# Altium schematic symbol library LMG2100R044RARR.SchLib: 1 symbol
Pins are listed as number, name and electrical type; pins without a type are passive.

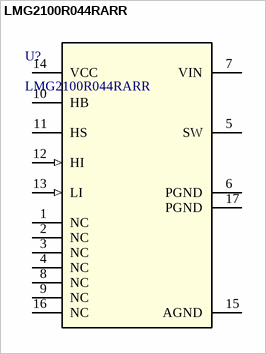
[diagram p0: symbol LMG2100R044RARR]

## LMG2100R044RARR
designator U?
100-V 4.4-mâ„¦ half-bridge GaN FET with integrated driver and protection 16-VQFN-FCRLF -40 to 125; Manufacturer_Name: Texas Instruments; TYPE: TYPE; RefDes: RefDes; Copyright: Copyright (C) 2026 Ultra Librarian. All rights reserved.; Manufacturer_Part_Number: LMG2100R044RARR
footprint RAR0016B-MFG
pins: 1 NC, 2 NC, 3 NC, 4 NC, 5 SW (power), 6 PGND (power), 7 VIN (power), 8 NC, 9 NC, 10 HB (power), 11 HS (power), 12 HI (in), 13 LI (in), 14 VCC (power), 15 AGND (power), 16 NC, 17 PGND (power)